# Altium footprint library Footprint.PcbLib: 154 footprints (part 4 of 10)
Each footprint in its own frame and in the unit in brackets; x right, y up, seen from the top. Pads: shape width x height; smd on the part's side, far side on the other; paste and mask are expansions set on the pad; w line width, h text height; cw(c..) or ccw(c..) is an arc to the next point about the centre after c.
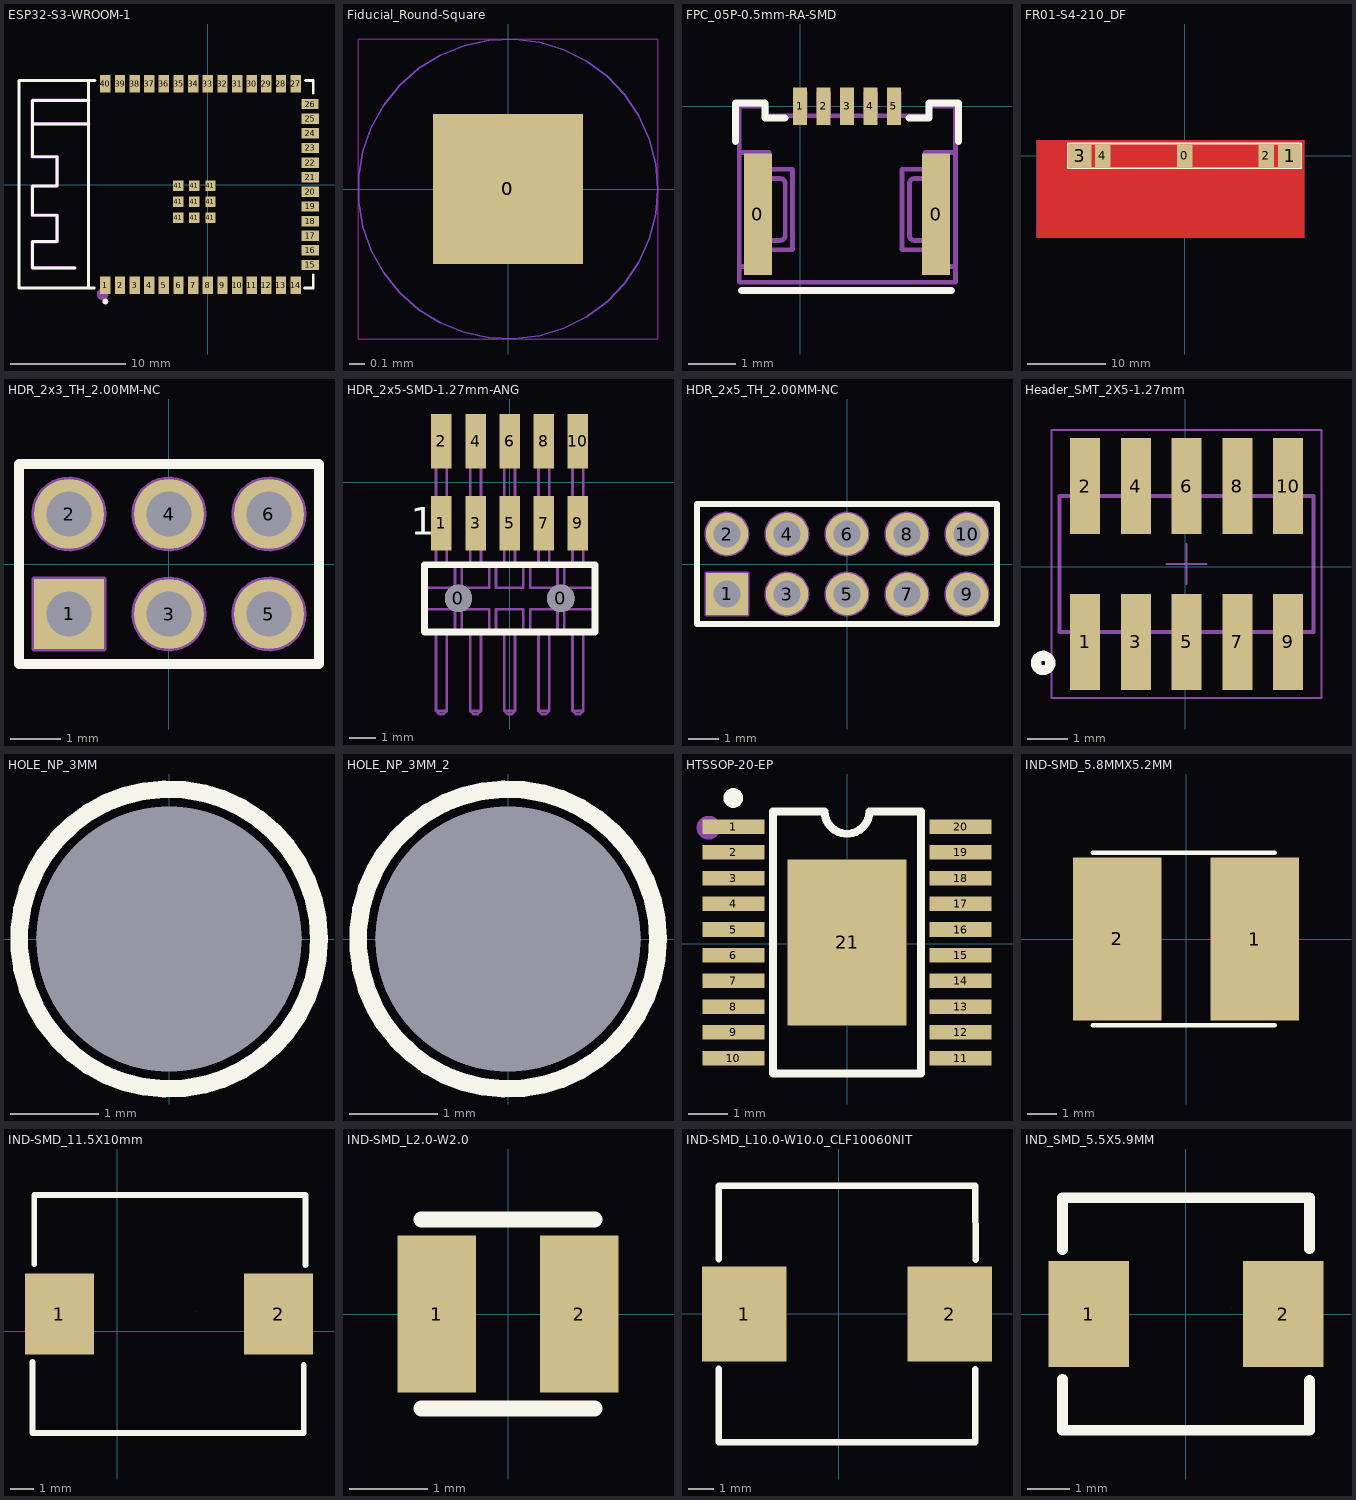
[diagram p3: the footprints below, top view; thin cyan lines are the x and y axes]

## ESP32-S3-WROOM-1 [mm]
pads (49):
  rect 0.9x1.5 smd: 1(-8.895,-8.75) 2(-7.625,-8.75) 3(-6.355,-8.75) 4(-5.085,-8.75) 5(-3.815,-8.75) 6(-2.545,-8.75) 7(-1.275,-8.75) 8(-0.005,-8.75) 9(1.265,-8.75) 10(2.535,-8.75) 11(3.805,-8.75) 12(5.075,-8.75) 13(6.345,-8.75) 14(7.615,-8.75) 27(7.615,8.75) 28(6.345,8.75) 29(5.075,8.75) 30(3.805,8.75) 31(2.535,8.75) 32(1.265,8.75) 33(-0.005,8.75) 34(-1.275,8.75) 35(-2.545,8.75) 36(-3.815,8.75) 37(-5.085,8.75) 38(-6.355,8.75) 39(-7.625,8.75) 40(-8.895,8.75)
  rect 1.5x0.9 smd: 15(8.895,-6.985) 16(8.895,-5.715) 17(8.895,-4.445) 18(8.895,-3.175) 19(8.895,-1.905) 20(8.895,-0.635) 21(8.895,0.635) 22(8.895,1.905) 23(8.895,3.175) 24(8.895,4.445) 25(8.895,5.715) 26(8.865,6.985)
  rect 0.9x0.9 smd: 41(-2.575,-2.9) 41(-2.575,-1.501) 41(-2.575,-0.1) 41(-1.175,-2.9) 41(-1.175,-1.501) 41(-1.175,-0.1) 41(0.225,-2.9) 41(0.225,-0.1) 41(0.225,-1.501)
Top Overlay:
  circle w0.254: c-8.897,-10.155 r0.124
  lines w0.254: -15.24,5.062 -15.24,7.297 -10.355,7.297 ; -11.557,-7.239 -15.24,-7.239 -15.24,-4.953 -13.081,-4.953 -13.081,-2.667 -15.24,-2.667 -15.24,-0.127 -13.081,-0.127 -13.081,2.413 -15.24,2.413 -15.24,5.265 -10.355,5.265 ; -10.355,-9 -10.355,9.017 ; -9.862,-9 -16.395,-9 -16.395,9.017 -9.811,9.017 ; 8.4,-9 9.144,-9 9.144,-7.869 ; 8.477,9.017 9.144,9.017 9.144,7.937
Mechanical 15:
  drawing of 2 lines, arcs and shapes, not listed
3D body "ESP32-S3-WROOM.step": height 3.11, standoff -0.05, extent -16.144,-9.056 9.366,8.964

## Fiducial_Round-Square [mm]
pads (2):
  rect 1x1 smd paste-10 mask+0.5: 0(0,0)
  round 1 smd far side paste-10 mask+0.5: 0(0,0)
Top Layer keep-out:
  lines w0.01: -1,-1 1,-1 1,1 -1,1 -1,-1
Bottom Layer keep-out:
  circle w0.01: c0,0 r1

## FPC_05P-0.5mm-RA-SMD [mm]
pads (7):
  rect 0.6x2.6 smd: 0(-0.9,-2.3) 0(2.9,-2.3)
  rect 0.3x0.8 smd mask+0.05: 1(0,0) 2(0.5,0) 3(1,0) 4(1.5,0) 5(2,0)
Top Overlay:
  lines w0.15: -1.375,-0.75 -1.375,0.075 -0.75,0.075 -0.75,-0.25 -0.325,-0.25 ; -1.25,-3.925 3.225,-3.925 ; 2.325,-0.25 2.75,-0.25 2.75,0.075 3.375,0.075 3.375,-0.75
Mechanical 7:
  lines w0.1: -1.3,-3.416 -0.661,-3.416 -0.661,-3.06 -0.162,-3.06 -0.162,-1.34 -0.661,-1.34 -0.661,-0.983 -1.3,-0.983 ; -1.033,-3.416 -1.033,-0.983 ; -1.027,-2.86 -0.422,-2.86 ccw(c-0.418,-2.762) -0.321,-2.761 -0.321,-1.642 ccw(c-0.418,-1.638) -0.422,-1.54 -1.027,-1.54 ; -0.098,-0.198 -0.098,0.305 0.106,0.305 0.106,-0.198 ; -0.098,-0.048 0.106,-0.048 ; -0.098,0.006 0.106,0.006 ; 0.401,-0.198 0.401,0.305 0.605,0.305 0.605,-0.198 ; 0.401,-0.048 0.605,-0.048 ; 0.401,0.006 0.605,0.006 ; 0.901,-0.198 0.901,0.305 1.104,0.305 1.104,-0.198 ; 0.901,-0.048 1.104,-0.048 ; 0.901,0.006 1.104,0.006 ; 1.406,-0.198 1.406,0.305 1.61,0.305 1.61,-0.198 ; 1.406,-0.048 1.61,-0.048 ; 1.406,0.006 1.61,0.006 ; 1.905,-0.198 1.905,0.305 2.109,0.305 2.109,-0.198 ; 1.905,-0.048 2.109,-0.048 ; 1.905,0.006 2.109,0.006 ; 3.039,-2.86 2.435,-2.86 cw(c2.431,-2.762) 2.333,-2.761 2.333,-1.642 cw(c2.431,-1.638) 2.435,-1.54 3.039,-1.54 ; 3.046,-3.416 3.046,-0.983 ; 3.313,-3.416 2.674,-3.416 2.674,-3.06 2.174,-3.06 2.174,-1.34 2.674,-1.34 2.674,-0.983 3.313,-0.983 ; -1.3,-3.75 -1.3,0.006 -0.712,0.006 -0.712,-0.198 2.724,-0.198 2.724,0.006 3.313,0.006 3.313,-3.75 -1.3,-3.75
  text ".Designator" at 0.55,-2.15 h0.38
3D body "512810594.stp": height 1.2, standoff 0, extent -1.3,-3.85 3.3,0.2

## FR01-S4-210_DF [mm]
pads (5):
  rect 2x3 smd: 0(0,0) 2(10.5,0) 4(-10.5,0)
  rect 3x3 smd: 1(13.5,0) 3(-13.5,0)
Top Layer:
  region: 15,-10.211 15,-0.312 14,-0.312 14,-10.211
  region: 13,-0.5 12,-0.5 12,-4 13,-4
  region: 11.5,-0.5 10.5,-0.5 10.5,-4 11.5,-4
  region: -12,-0.5 -13,-0.5 -13,-4 -12,-4
  region: -10.5,-0.5 -11.5,-0.5 -11.5,-4 -10.5,-4
  pour cut-out: -19.025,2 15.4,2 15.4,-10.5 -19.025,-10.5
  region: 15,-9.2 15,-10.211 13,-10.211 13,-9.2
Mid-Layer 1:
  pour cut-out: -19.075,2 15.4,2 15.4,-10.5 -19.075,-10.5
Mid-Layer 2:
  pour cut-out: -19.101,2 15.4,2 15.4,-10.5 -19.101,-10.5
Bottom Layer:
  pour cut-out: -19.075,2 15.4,2 15.4,-10.5 -19.075,-10.5
Top Overlay:
  lines w0.2: -15,-1.6 15,-1.6 15,1.6 -15,1.6 -15,-1.6
Mechanical 7:
  circle w0.1: c-11,-0.9 r0.225
  circle w0.1: c-11,0.9 r0.225
  circle w0.1: c11,-0.9 r0.225
  circle w0.1: c11,0.9 r0.225
  circle w0.1: c14.4,-0.9 r0.225
  circle w0.1: c0,-0.9 r0.225
  circle w0.1: c14.4,0.9 r0.225
  circle w0.1: c0,0.9 r0.225
  circle w0.1: c-14.4,-0.9 r0.225
  circle w0.1: c-14.4,0.9 r0.225
  lines w0.1: -15,-1.5 -15,1.5 15,1.5 15,-1.5 -15,-1.5 ; -7,-1 -6.68,-1 -6.68,0.285 -5.24,-1 -5.24,0.285 -3.8,-1 -3.8,1 -4.12,1 -4.12,-0.285 -5.56,1 -5.56,-0.285 -7,1 -7,-1
  text ".Designator" at -0.325,-0.175 h0.38
3D body "FR01-S4-210.step": height 1, standoff 0, extent -15,-1.5 15,1.5

## HDR_2x3_TH_2.00MM-NC [mm]
pads (6):
  rect 1.4x1.4 hole 0.9: 1(-2,-1)
  round 1.4 hole 0.9: 2(-2,1) 3(0,-1) 4(0,1) 5(2,-1) 6(2,1)
Top Overlay:
  lines w0.2: -3,-2 -3,2 3,2 3,-2 -3,-2
Mechanical 7:
  circle w0.1: c-2,-1 r0.45
  circle w0.1: c0,-1 r0.45
  circle w0.1: c0,-1 r0.7
  circle w0.1: c2,-1 r0.45
  circle w0.1: c2,-1 r0.7
  circle w0.1: c2,1 r0.45
  circle w0.1: c2,1 r0.7
  circle w0.1: c0,1 r0.45
  circle w0.1: c0,1 r0.7
  circle w0.1: c-2,1 r0.45
  circle w0.1: c-2,1 r0.7
  lines w0.1: -3,-2 3,-2 3,2 -3,2 -3,-2 ; -2.7,-1.7 -2.7,-0.3 -1.3,-0.3 -1.3,-1.7 -2.7,-1.7
  text ".Designator" at 0.425,-0.125 h0.31
Mechanical 8:
  circle w0.1: c-2,-1 r0.45
  circle w0.1: c0,-1 r0.7
  circle w0.1: c0,-1 r0.45
  circle w0.1: c2,-1 r0.7
  circle w0.1: c2,-1 r0.45
  circle w0.1: c2,1 r0.7
  circle w0.1: c2,1 r0.45
  circle w0.1: c0,1 r0.7
  circle w0.1: c0,1 r0.45
  circle w0.1: c-2,1 r0.7
  circle w0.1: c-2,1 r0.45
  lines w0.1: -2.7,-1.7 -1.3,-1.7 -1.3,-0.3 -2.7,-0.3 -2.7,-1.7

## HDR_2x5-SMD-1.27mm-ANG [mm]
pads (12):
  round 1.02 hole 1.02 unplated: 0(-1.905,-4.32) 0(1.905,-4.32)
  rect 0.76x2.03 smd: 1(-2.54,-1.525) 2(-2.54,1.525) 3(-1.27,-1.525) 4(-1.27,1.525) 5(0,-1.525) 6(0,1.525) 7(1.27,-1.525) 8(1.27,1.525) 9(2.54,-1.525) 10(2.54,1.525)
Top Overlay:
  lines w0.254: -3.17,-5.57 -3.17,-3.07 3.17,-3.07 3.17,-5.57 -3.17,-5.57
  text "1" at -3.68,-1.96 h1.02
Mechanical 7:
  lines w0.1: -3.17,-4.72 -2.032,-4.72 -2.032,-5.57 ; -3.17,-3.92 -2.032,-3.92 -2.032,-3.048 ; -2.74,-5.57 -2.74,-8.5 ; -2.74,-3.048 -2.74,2.282 -2.34,2.282 -2.34,-3.048 ; -2.74,-0.758 -2.34,-0.758 ; -2.74,1.472 -2.34,1.472 ; -2.34,-5.57 -2.34,-8.5 ; -1.778,-5.57 -1.778,-4.72 -0.762,-4.72 -0.762,-5.57 ; -1.778,-3.048 -1.778,-3.92 -0.762,-3.92 -0.762,-3.048 ; -1.47,-5.57 -1.47,-8.5 ; -1.47,-3.048 -1.47,2.282 -1.07,2.282 -1.07,-3.048 ; -1.47,-0.758 -1.07,-0.758 ; -1.47,1.472 -1.07,1.472 ; -1.07,-5.57 -1.07,-8.5 ; -0.508,-5.57 -0.508,-4.72 0.508,-4.72 0.508,-5.57 ; -0.508,-3.048 -0.508,-3.92 0.508,-3.92 0.508,-3.048 ; -0.2,-5.57 -0.2,-8.5 ; -0.2,-3.048 -0.2,2.282 0.2,2.282 0.2,-3.048 ; -0.2,-0.758 0.2,-0.758 ; -0.2,1.472 0.2,1.472 ; 0.2,-5.57 0.2,-8.5 ; 0.762,-5.57 0.762,-4.72 1.778,-4.72 1.778,-5.57 ; 0.762,-3.048 0.762,-3.92 1.778,-3.92 1.778,-3.048 ; 1.07,-5.57 1.07,-8.5 ; 1.07,-3.048 1.07,2.282 1.47,2.282 1.47,-3.048 ; 1.07,-0.758 1.47,-0.758 ; 1.07,1.472 1.47,1.472 ; 1.47,-5.57 1.47,-8.5 ; 2.032,-5.57 2.032,-4.72 3.17,-4.72 ; 2.032,-3.048 2.032,-3.92 3.17,-3.92 ; 2.34,-5.57 2.34,-8.5 ; 2.34,-3.048 2.34,2.282 2.74,2.282 2.74,-3.048 ; 2.34,-0.758 2.74,-0.758 ; 2.34,1.472 2.74,1.472 ; 2.74,-5.57 2.74,-8.5 ; -2.74,-8.5 -2.34,-8.5 ; -2.74,-8.5 -2.62,-8.62 -2.46,-8.62 -2.34,-8.5 ; -1.47,-8.5 -1.35,-8.62 -1.19,-8.62 -1.07,-8.5 ; -1.47,-8.5 -1.07,-8.5 ; -0.2,-8.5 -0.08,-8.62 0.08,-8.62 0.2,-8.5 ; -0.2,-8.5 0.2,-8.5 ; 1.07,-8.5 1.19,-8.62 1.35,-8.62 1.47,-8.5 ; 1.07,-8.5 1.47,-8.5 ; 2.34,-8.5 2.46,-8.62 2.62,-8.62 2.74,-8.5 ; 2.34,-8.5 2.74,-8.5 ; -3.17,-5.57 3.17,-5.57 3.17,-3.048 -3.17,-3.048 -3.17,-5.57
  text ".Designator" at -0.8,-4.5 h0.38
3D body "Samtec-FTSH-105-01-L-DH-A.step": height 3.41, standoff -1.03, extent -3.175,-8.627 3.175,2.27

## HDR_2x5_TH_2.00MM-NC [mm]
pads (10):
  rect 1.4x1.4 hole 0.9: 1(-4,-1)
  round 1.4 hole 0.9: 2(-4,1) 3(-2,-1) 4(-2,1) 5(0,-1) 6(0,1) 7(2,-1) 8(2,1) 9(4,-1) 10(4,1)
Top Overlay:
  lines w0.2: -5,-2 -5,2 5,2 5,-2 -5,-2
Mechanical 7:
  circle w0.1: c4,1 r0.7
  circle w0.1: c4,1 r0.45
  circle w0.1: c4,-1 r0.7
  circle w0.1: c4,-1 r0.45
  circle w0.1: c-4,-1 r0.45
  circle w0.1: c-2,-1 r0.45
  circle w0.1: c-2,-1 r0.7
  circle w0.1: c0,-1 r0.45
  circle w0.1: c0,-1 r0.7
  circle w0.1: c2,-1 r0.45
  circle w0.1: c2,-1 r0.7
  circle w0.1: c2,1 r0.45
  circle w0.1: c2,1 r0.7
  circle w0.1: c0,1 r0.45
  circle w0.1: c0,1 r0.7
  circle w0.1: c-2,1 r0.45
  circle w0.1: c-2,1 r0.7
  circle w0.1: c-4,1 r0.45
  circle w0.1: c-4,1 r0.7
  lines w0.1: -5,-2 -5,2 5,2 5,-2 -5,-2 ; -4.7,-1.7 -4.7,-0.3 -3.3,-0.3 -3.3,-1.7 -4.7,-1.7
  text ".Designator" at -1.575,-0.125 h0.31
Mechanical 8:
  circle w0.1: c4,1 r0.45
  circle w0.1: c4,1 r0.7
  circle w0.1: c4,-1 r0.45
  circle w0.1: c4,-1 r0.7
  circle w0.1: c-4,-1 r0.45
  circle w0.1: c-2,-1 r0.7
  circle w0.1: c-2,-1 r0.45
  circle w0.1: c0,-1 r0.7
  circle w0.1: c0,-1 r0.45
  circle w0.1: c2,-1 r0.7
  circle w0.1: c2,-1 r0.45
  circle w0.1: c2,1 r0.7
  circle w0.1: c2,1 r0.45
  circle w0.1: c0,1 r0.7
  circle w0.1: c0,1 r0.45
  circle w0.1: c-2,1 r0.7
  circle w0.1: c-2,1 r0.45
  circle w0.1: c-4,1 r0.7
  circle w0.1: c-4,1 r0.45
  lines w0.1: -4.7,-1.7 -3.3,-1.7 -3.3,-0.3 -4.7,-0.3 -4.7,-1.7

## Header_SMT_2X5-1.27mm [mm]
pads (10):
  rect 0.75x2.4 smd: 1(-2.509,-1.886) 2(-2.509,2.014) 3(-1.239,-1.886) 4(-1.239,2.014) 5(0.031,-1.886) 6(0.031,2.014) 7(1.301,-1.886) 8(1.301,2.014) 9(2.571,-1.886) 10(2.571,2.014)
Top Overlay:
  circle w0.254: c-3.556,-2.413 r0.18
Top Courtyard:
  lines w0.05: -0.469,0.064 0.531,0.064 ; 0.031,-0.436 0.031,0.564 ; -3.344,-3.286 3.406,-3.286 3.406,3.414 -3.344,3.414 -3.344,-3.286
Top Component Outline:
  lines w0.1: -3.144,-1.636 3.206,-1.636 ; -3.144,-1.636 -3.144,1.764 ; -3.144,-1.636 3.206,-1.636 ; -3.144,-1.636 -3.144,1.764 ; -3.144,1.764 3.206,1.764 ; -3.144,1.764 3.206,1.764 ; -2.709,-2.436 -2.309,-2.436 ; -2.709,-2.436 -2.709,-1.636 -2.709,-2.436 ; -2.709,-2.436 -2.309,-2.436 ; -2.709,2.564 -2.709,1.764 -2.709,2.564 ; -2.709,2.564 -2.309,2.564 ; -2.709,2.564 -2.309,2.564 ; -2.309,-2.436 -2.309,-1.636 -2.309,-2.436 ; -2.309,2.564 -2.309,1.764 -2.309,2.564 ; -1.439,-2.436 -1.039,-2.436 ; -1.439,-2.436 -1.439,-1.636 -1.439,-2.436 ; -1.439,-2.436 -1.039,-2.436 ; -1.439,2.564 -1.039,2.564 ; -1.439,2.564 -1.439,1.764 -1.439,2.564 ; -1.439,2.564 -1.039,2.564 ; -1.039,-2.436 -1.039,-1.636 -1.039,-2.436 ; -1.039,2.564 -1.039,1.764 -1.039,2.564 ; -0.169,-2.436 -0.169,-1.636 -0.169,-2.436 ; -0.169,-2.436 0.231,-2.436 ; -0.169,-2.436 0.231,-2.436 ; -0.169,2.564 -0.169,1.764 -0.169,2.564 ; -0.169,2.564 0.231,2.564 ; -0.169,2.564 0.231,2.564 ; 0.231,-2.436 0.231,-1.636 0.231,-2.436 ; 0.231,2.564 0.231,1.764 0.231,2.564 ; 1.101,-2.436 1.501,-2.436 ; 1.101,-2.436 1.101,-1.636 1.101,-2.436 ; 1.101,-2.436 1.501,-2.436 ; 1.101,2.564 1.501,2.564 ; 1.101,2.564 1.101,1.764 1.101,2.564 ; 1.101,2.564 1.501,2.564 ; 1.501,-2.436 1.501,-1.636 1.501,-2.436 ; 1.501,2.564 1.501,1.764 1.501,2.564 ; 2.371,-2.436 2.371,-1.636 2.371,-2.436 ; 2.371,-2.436 2.771,-2.436 ; 2.371,-2.436 2.771,-2.436 ; 2.371,2.564 2.371,1.764 2.371,2.564 ; 2.371,2.564 2.771,2.564 ; 2.371,2.564 2.771,2.564 ; 2.771,-2.436 2.771,-1.636 2.771,-2.436 ; 2.771,2.564 2.771,1.764 2.771,2.564 ; 3.206,-1.636 3.206,1.764 ; 3.206,-1.636 3.206,1.764
3D body "62131021021.stp": height 5.9, standoff 0, extent -3.144,-2.486 3.206,2.614

## HOLE_NP_3MM [mm]
pads (1):
  round 3 hole 3 unplated paste-2539.97 mask+0: ""(0,0)
Top Overlay:
  circle w0.2: c0,0 r1.7

## HOLE_NP_3MM_2 [mm]
pads (1):
  round 3 hole 3 unplated paste-2539.97 mask+0: ""(0,0)
Top Overlay:
  circle w0.2: c0,0 r1.7

## HTSSOP-20-EP [mil]
pads (21):
  rect 61.5x14.5 smd paste+0 mask+2: 1(-113.25,116.42) 2(-113.25,90.83) 3(-113.25,65.24) 4(-113.25,39.65) 5(-113.25,14.06) 6(-113.25,-11.53) 7(-113.25,-37.12) 8(-113.25,-62.71) 9(-113.25,-88.3) 10(-113.25,-113.89) 11(112.75,-113.89) 12(112.75,-88.3) 13(112.75,-62.71) 14(112.75,-37.12) 15(112.75,-11.53) 16(112.75,14.06) 17(112.75,39.65) 18(112.75,65.24) 19(112.75,90.83) 20(112.75,116.42)
  rect 118.11x165.35 smd paste+0 mask+2: 21(-0.25,1.26)
Top Overlay:
  lines w7.9: -22.55,131.56 ccw(c-0.25,131.57) 22.05,131.58 73.23,131.58 73.23,-129.05 -73.72,-129.05 -73.72,131.58 -22.53,131.58
  lines w9.8: -108.55,144.86 cw(c-113.45,144.91) -108.55,144.97
Mechanical 15:
  circle w11.81: c-138.04,115.43 r5.91
3D body "LM3102MHX_NOPB.step": height 43.31, standoff 0, extent -126.23,-126.68 125.74,129.22

## IND-SMD_5.8MMX5.2MM [mm]
pads (2):
  rect 3x5.5 smd paste-100 mask+0.05: 1(2.325,0) 2(-2.325,0)
Top Overlay:
  lines w0.152: -3.15,-2.921 3.002,-2.921 ; -3.15,2.921 3.002,2.921
3D body "SMD_Inductor_CD43.step": height 3.22, standoff -0.01, extent -2.326,-2.381 2.174,1.619

## IND-SMD_11.5X10mm [mm]
pads (2):
  rect 3x3.5 smd: 1(-2.513,0.74) 2(6.987,0.74)
Top Overlay:
  lines w0.254: -3.683,-1.346 -3.683,-4.42 8.077,-4.42 8.077,-1.473 ; -3.603,2.896 -3.603,5.9 8.157,5.9 8.157,2.87
Mechanical 15:
  lines w0.003: 3.443,0.867 3.444,0.868
3D body "CDRH104R.STEP": height 3.8, standoff 0, extent -2.713,-4.34 7.387,5.56

## IND-SMD_L2.0-W2.0 [mm]
pads (2):
  rect 1x2 smd paste+0 mask+0.051: 1(-0.905,0) 2(0.905,0)
Top Overlay:
  lines w0.2: -1.1,-1.2 1.1,-1.2 ; -1.1,1.2 1.1,1.2
3D body "IND_H2R2MT_SNL.step": height 1.19, standoff 0, extent -1.13,-1.057 0.978,1.057

## IND-SMD_L10.0-W10.0_CLF10060NIT [mm]
pads (2):
  rect 3.3x3.7 smd paste+0 mask+0.051: 1(-3.684,-0.004) 2(4.316,-0.004)
Top Overlay:
  lines w0.254: -4.684,-2.134 -4.684,-5.004 5.316,-5.004 5.316,-2.159 ; -4.684,2.134 -4.684,4.996 ; -4.684,4.997 5.316,4.997 5.316,4.995 5.334,2.108
3D body "10x10mm.step": height 3.97, standoff 0.06, extent -5.217,-4.96 5.543,5.04

## IND_SMD_5.5X5.9MM [mm]
pads (2):
  rect 1.9x2.5 smd paste+0 mask+0.05: 1(-2.3,0) 2(2.3,0)
Top Overlay:
  lines w0.254: -2.925,2.75 2.925,2.75 2.925,1.545 ; -2.921,-1.545 -2.921,-2.75 2.925,-2.75 2.925,-1.575 ; -2.921,1.524 -2.921,2.75
Mechanical 15:
  lines w0.003: 1.079,0.127 1.08,0.127
3D body "L_5x5mm_h2mm.step": height 2, standoff 0, extent -2.576,-2.46 2.424,2.54